# Altium schematic symbol library 2019-12-09_06-57-52.SchLib: 2 symbols
Pins are listed as number, name and electrical type; pins without a type are passive.

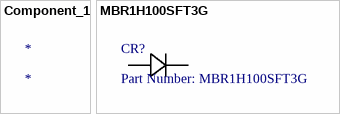
[diagram p0: symbols Component_1 to MBR1H100SFT3G]

## Component_1
designator *

## MBR1H100SFT3G
designator CR?, comment Part Number: MBR1H100SFT3G
No Description Available; Vendor: ON Semiconductor; Built_By: EMA_Anthony; Type: DEV; Copyright: Copyright (C) 2016 Accelerated Designs. All rights reserved; Manufacturer_Part_Number: MBR1H100SFT3G; RefDes: RefDes; Value: Value
footprint DIODE_SOD123LF_2
pins: 1, 2